# Altium footprint library Terminal_Blocks_Pluggable PCB_5.08mm.PcbLib: 299 footprints (part 16 of 19)
Each footprint in its own frame and in the unit in brackets; x right, y up, seen from the top. Pads: shape width x height; smd on the part's side, far side on the other; paste and mask are expansions set on the pad; w line width, h text height; cw(c..) or ccw(c..) is an arc to the next point about the centre after c.
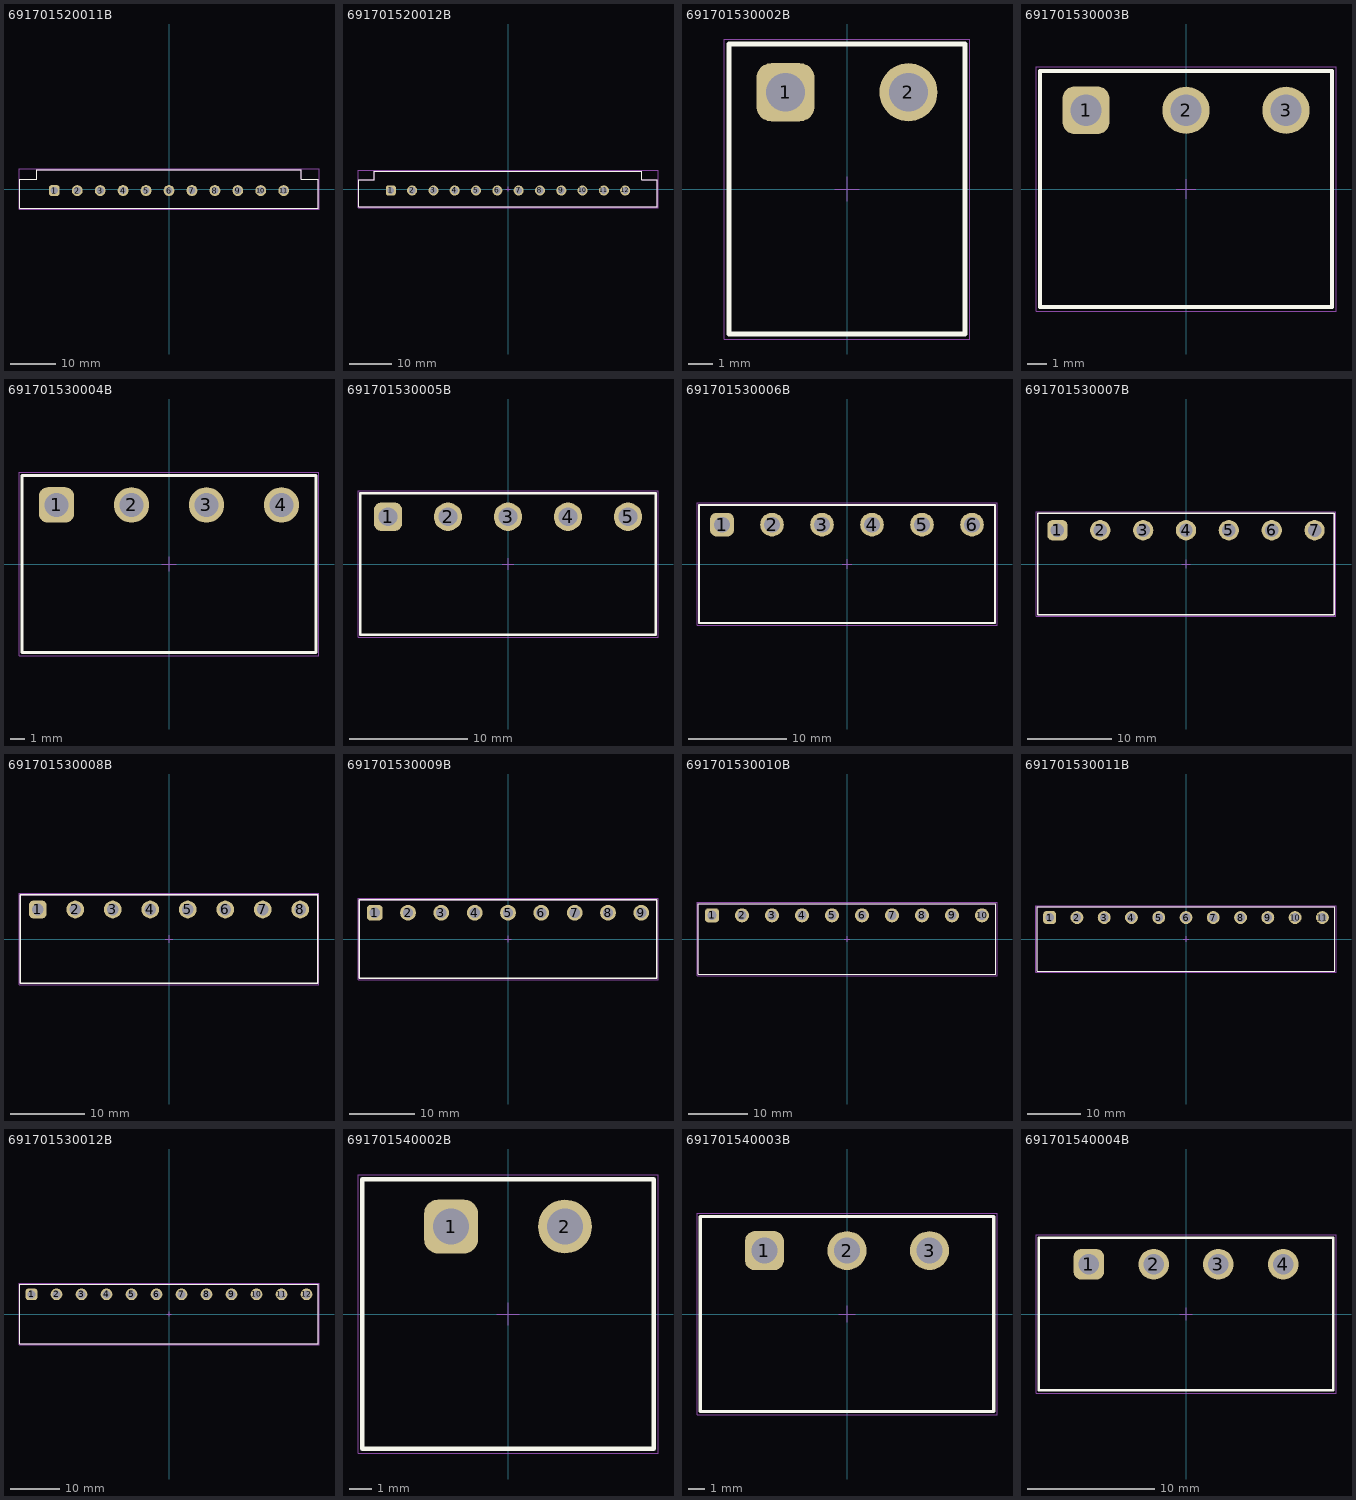
[diagram p15: the footprints below, top view; thin cyan lines are the x and y axes]

## 691701520011B [mm] "THR - 5,08mm - PCB Vertical Flange - 11p"
height 12
pads (11):
  rrect50% 2.4x2.4 hole 1.6: 1(-25.4,-0.35)
  round 2.4 hole 1.6: 2(-20.32,-0.35) 3(-15.24,-0.35) 4(-10.16,-0.35) 5(-5.08,-0.35) 6(0,-0.35) 7(5.08,-0.35) 8(10.16,-0.35) 9(15.24,-0.35) 10(20.32,-0.35) 11(25.4,-0.35)
Top Overlay:
  lines w0.2: -33.02,-4.25 33.02,-4.25 33.02,2.15 29.34,2.15 29.34,4.25 -29.34,4.25 -29.34,2.15 -33.02,2.15 -33.02,-4.25
Top Designator:
  text ".Designator" at -7.498,-0.5 h1.5
Top Component Outline:
  lines w0.1: -33.02,-4.25 -33.02,2.15 -29.34,2.15 -29.34,4.25 29.34,4.25 29.34,2.15 33.02,2.15 33.02,-4.25 -33.02,-4.25
Top 3D Body:
  lines w0.1: -33.02,-4.25 33.02,-4.25 33.02,2.15 29.34,2.15 29.34,4.25 -29.34,4.25 -29.34,2.15 -33.02,2.15 -33.02,-4.25
Top Courtyard:
  lines w0.05: -33.22,-4.45 33.22,-4.45 33.22,4.45 -33.22,4.45 -33.22,-4.45
Top Component Center:
  lines w0.05: -0.5,0 0.5,0 ; 0,-0.5 0,0.5
3D body "691701520011B.stp": height 12.1, standoff -2.5, extent -33.02,-4.25 33.02,4.25

## 691701520012B [mm] "THR - 5,08mm - PCB Vertical Flange - 12p"
height 12
pads (12):
  rrect50% 2.4x2.4 hole 1.6: 1(-27.94,-0.35)
  round 2.4 hole 1.6: 2(-22.86,-0.35) 3(-17.78,-0.35) 4(-12.7,-0.35) 5(-7.62,-0.35) 6(-2.54,-0.35) 7(2.54,-0.35) 8(7.62,-0.35) 9(12.7,-0.35) 10(17.78,-0.35) 11(22.86,-0.35) 12(27.94,-0.35)
Top Overlay:
  lines w0.2: -35.56,-4.25 -35.56,2.15 -31.88,2.15 -31.88,4.25 31.88,4.25 31.88,2.15 35.56,2.15 35.56,-4.25 -35.56,-4.25
Top Designator:
  text ".Designator" at -7.498,-0.5 h1.5
Top Component Outline:
  lines w0.1: -35.56,-4.25 35.56,-4.25 35.56,2.15 31.88,2.15 31.88,4.25 -31.88,4.25 -31.88,2.15 -35.56,2.15 -35.56,-4.25
Top 3D Body:
  lines w0.1: -35.56,-4.25 -35.56,2.15 -31.88,2.15 -31.88,4.25 31.88,4.25 31.88,2.15 35.56,2.15 35.56,-4.25 -35.56,-4.25
Top Courtyard:
  lines w0.05: -35.76,-4.45 -35.76,4.45 35.76,4.45 35.76,-4.45 -35.76,-4.45
Top Component Center:
  lines w0.05: -0.5,0 0.5,0 ; 0,-0.5 0,0.5
3D body "691701520012B.stp": height 12.1, standoff -2.5, extent -35.56,-4.25 35.56,4.25

## 691701530002B [mm] "THR - 5,08mm - PCB Horizontal Open - 02p"
height 8.4
pads (2):
  rrect50% 2.4x2.4 hole 1.6: 1(-2.54,4)
  round 2.4 hole 1.6: 2(2.54,4)
Top Overlay:
  lines w0.2: 4.84,-6 -4.88,-6 -4.88,6 4.84,6 ; 4.88,-6 4.88,6
Top Designator:
  text ".Designator" at -7.498,-0.5 h1.5
Top Component Outline:
  lines w0.1: 4.84,-6 -4.88,-6 -4.88,6 4.84,6 ; 4.88,-6 4.88,6
Top 3D Body:
  lines w0.1: 4.84,-6 -4.88,-6 -4.88,6 4.84,6 ; 4.88,-6 4.88,6
Top Courtyard:
  lines w0.05: -5.08,-6.2 -5.08,6.2 5.08,6.2 5.08,-6.2 -5.08,-6.2
Top Component Center:
  lines w0.05: -0.5,0 0.5,0 ; 0,-0.5 0,0.5
3D body "691701530002B.stp": height 8.6, standoff -2.7, extent -4.9,-6 4.86,6

## 691701530003B [mm] "THR - 5,08mm - PCB Horizontal Open - 03p"
height 8.4
pads (3):
  rrect50% 2.4x2.4 hole 1.6: 1(-5.08,4)
  round 2.4 hole 1.6: 2(0,4) 3(5.08,4)
Top Overlay:
  lines w0.2: -7.42,-6 -7.42,6 7.42,6 7.42,-6 -7.42,-6
Top Designator:
  text ".Designator" at -7.498,-0.5 h1.5
Top Component Outline:
  lines w0.1: -7.42,-6 7.42,-6 7.42,6 -7.42,6 -7.42,-6
Top 3D Body:
  lines w0.1: -7.42,-6 -7.42,6 7.42,6 7.42,-6 -7.42,-6
Top Courtyard:
  lines w0.05: -7.62,-6.2 7.62,-6.2 7.62,6.2 -7.62,6.2 -7.62,-6.2
Top Component Center:
  lines w0.05: -0.5,0 0.5,0 ; 0,-0.5 0,0.5
3D body "691701530003B.stp": height 8.6, standoff -2.7, extent -7.42,-6 7.42,6

## 691701530004B [mm] "THR - 5,08mm - PCB Horizontal Open - 04p"
height 8.4
pads (4):
  rrect50% 2.4x2.4 hole 1.6: 1(-7.62,4)
  round 2.4 hole 1.6: 2(-2.54,4) 3(2.54,4) 4(7.62,4)
Top Overlay:
  lines w0.2: -9.96,-6 9.96,-6 9.96,6 -9.96,6 -9.96,-6
Top Designator:
  text ".Designator" at -7.498,-0.5 h1.5
Top Component Outline:
  lines w0.1: -9.96,-6 -9.96,6 9.96,6 9.96,-6 -9.96,-6
Top 3D Body:
  lines w0.1: -9.96,-6 9.96,-6 9.96,6 -9.96,6 -9.96,-6
Top Courtyard:
  lines w0.05: -10.16,-6.2 -10.16,6.2 10.16,6.2 10.16,-6.2 -10.16,-6.2
Top Component Center:
  lines w0.05: -0.5,0 0.5,0 ; 0,-0.5 0,0.5
3D body "691701530004B.stp": height 8.6, standoff -2.7, extent -9.96,-6 9.96,6

## 691701530005B [mm] "THR - 5,08mm - PCB Horizontal Open - 05p"
height 8.4
pads (5):
  rrect50% 2.4x2.4 hole 1.6: 1(-10.16,4)
  round 2.4 hole 1.6: 2(-5.08,4) 3(0,4) 4(5.08,4) 5(10.16,4)
Top Overlay:
  lines w0.2: -12.5,-6 -12.5,6 12.5,6 12.5,-6 -12.5,-6
Top Designator:
  text ".Designator" at -7.498,-0.5 h1.5
Top Component Outline:
  lines w0.1: -12.5,-6 12.5,-6 12.5,6 -12.5,6 -12.5,-6
Top 3D Body:
  lines w0.1: -12.5,-6 -12.5,6 12.5,6 12.5,-6 -12.5,-6
Top Courtyard:
  lines w0.05: -12.7,-6.2 12.7,-6.2 12.7,6.2 -12.7,6.2 -12.7,-6.2
Top Component Center:
  lines w0.05: -0.5,0 0.5,0 ; 0,-0.5 0,0.5
3D body "691701530005B.stp": height 8.6, standoff -2.7, extent -12.5,-6 12.5,6

## 691701530006B [mm] "THR - 5,08mm - PCB Horizontal Open - 06p"
height 8.4
pads (6):
  rrect50% 2.4x2.4 hole 1.6: 1(-12.7,4)
  round 2.4 hole 1.6: 2(-7.62,4) 3(-2.54,4) 4(2.54,4) 5(7.62,4) 6(12.7,4)
Top Overlay:
  lines w0.2: -15.04,-6 15.04,-6 15.04,6 -15.04,6 -15.04,-6
Top Designator:
  text ".Designator" at -7.498,-0.5 h1.5
Top Component Outline:
  lines w0.1: -15.04,-6 -15.04,6 15.04,6 15.04,-6 -15.04,-6
Top 3D Body:
  lines w0.1: -15.04,-6 15.04,-6 15.04,6 -15.04,6 -15.04,-6
Top Courtyard:
  lines w0.05: -15.24,-6.2 -15.24,6.2 15.24,6.2 15.24,-6.2 -15.24,-6.2
Top Component Center:
  lines w0.05: -0.5,0 0.5,0 ; 0,-0.5 0,0.5
3D body "691701530006B.stp": height 8.6, standoff -2.7, extent -15.04,-6 15.04,6

## 691701530007B [mm] "THR - 5,08mm - PCB Horizontal Open - 07p"
height 8.4
pads (7):
  rrect50% 2.4x2.4 hole 1.6: 1(-15.24,4)
  round 2.4 hole 1.6: 2(-10.16,4) 3(-5.08,4) 4(0,4) 5(5.08,4) 6(10.16,4) 7(15.24,4)
Top Overlay:
  lines w0.2: -17.58,-6 17.58,-6 17.58,6 -17.58,6 -17.58,-6
Top Designator:
  text ".Designator" at -7.498,-0.5 h1.5
Top Component Outline:
  lines w0.1: -17.58,-6 -17.58,6 17.58,6 17.58,-6 -17.58,-6
Top 3D Body:
  lines w0.1: -17.58,-6 17.58,-6 17.58,6 -17.58,6 -17.58,-6
Top Courtyard:
  lines w0.05: -17.78,-6.2 -17.78,6.2 17.78,6.2 17.78,-6.2 -17.78,-6.2
Top Component Center:
  lines w0.05: -0.5,0 0.5,0 ; 0,-0.5 0,0.5
3D body "691701530007B.stp": height 8.6, standoff -2.7, extent -17.58,-6 17.58,6

## 691701530008B [mm] "THR - 5,08mm - PCB Horizontal Open - 08p"
height 8.4
pads (8):
  rrect50% 2.4x2.4 hole 1.6: 1(-17.78,4)
  round 2.4 hole 1.6: 2(-12.7,4) 3(-7.62,4) 4(-2.54,4) 5(2.54,4) 6(7.62,4) 7(12.7,4) 8(17.78,4)
Top Overlay:
  lines w0.2: -20.12,-6 20.12,-6 20.12,6 -20.12,6 -20.12,-6
Top Designator:
  text ".Designator" at -7.498,-0.5 h1.5
Top Component Outline:
  lines w0.1: -20.12,-6 -20.12,6 20.12,6 20.12,-6 -20.12,-6
Top 3D Body:
  lines w0.1: -20.12,-6 20.12,-6 20.12,6 -20.12,6 -20.12,-6
Top Courtyard:
  lines w0.05: -20.32,-6.2 -20.32,6.2 20.32,6.2 20.32,-6.2 -20.32,-6.2
Top Component Center:
  lines w0.05: -0.5,0 0.5,0 ; 0,-0.5 0,0.5
3D body "691701530008B.stp": height 8.6, standoff -2.7, extent -20.12,-6 20.12,6

## 691701530009B [mm] "THR - 5,08mm - PCB Horizontal Open - 09p"
height 8.4
pads (9):
  rrect50% 2.4x2.4 hole 1.6: 1(-20.32,4)
  round 2.4 hole 1.6: 2(-15.24,4) 3(-10.16,4) 4(-5.08,4) 5(0,4) 6(5.08,4) 7(10.16,4) 8(15.24,4) 9(20.32,4)
Top Overlay:
  lines w0.2: -22.66,-6 22.66,-6 22.66,6 -22.66,6 -22.66,-6
Top Designator:
  text ".Designator" at -7.498,-0.5 h1.5
Top Component Outline:
  lines w0.1: -22.66,-6 -22.66,6 22.66,6 22.66,-6 -22.66,-6
Top 3D Body:
  lines w0.1: -22.66,-6 22.66,-6 22.66,6 -22.66,6 -22.66,-6
Top Courtyard:
  lines w0.05: -22.86,-6.2 -22.86,6.2 22.86,6.2 22.86,-6.2 -22.86,-6.2
Top Component Center:
  lines w0.05: -0.5,0 0.5,0 ; 0,-0.5 0,0.5
3D body "691701530009B.stp": height 8.6, standoff -2.7, extent -22.66,-6 22.66,6

## 691701530010B [mm] "THR - 5,08mm - PCB Horizontal Open - 10p"
height 8.4
pads (10):
  rrect50% 2.4x2.4 hole 1.6: 1(-22.86,4)
  round 2.4 hole 1.6: 2(-17.78,4) 3(-12.7,4) 4(-7.62,4) 5(-2.54,4) 6(2.54,4) 7(7.62,4) 8(12.7,4) 9(17.78,4) 10(22.86,4)
Top Overlay:
  lines w0.2: -25.2,-6 -25.2,6 25.2,6 25.2,-6 -25.2,-6
Top Designator:
  text ".Designator" at -7.498,-0.5 h1.5
Top Component Outline:
  lines w0.1: -25.2,-6 25.2,-6 25.2,6 -25.2,6 -25.2,-6
Top 3D Body:
  lines w0.1: -25.2,-6 -25.2,6 25.2,6 25.2,-6 -25.2,-6
Top Courtyard:
  lines w0.05: -25.4,-6.2 25.4,-6.2 25.4,6.2 -25.4,6.2 -25.4,-6.2
Top Component Center:
  lines w0.05: -0.5,0 0.5,0 ; 0,-0.5 0,0.5
3D body "691701530010B.stp": height 8.6, standoff -2.7, extent -25.2,-6 25.2,6

## 691701530011B [mm] "THR - 5,08mm - PCB Horizontal Open - 11p"
height 8.4
pads (11):
  rrect50% 2.4x2.4 hole 1.6: 1(-25.4,4)
  round 2.4 hole 1.6: 2(-20.32,4) 3(-15.24,4) 4(-10.16,4) 5(-5.08,4) 6(0,4) 7(5.08,4) 8(10.16,4) 9(15.24,4) 10(20.32,4) 11(25.4,4)
Top Overlay:
  lines w0.2: -27.74,-6 27.74,-6 27.74,6 -27.74,6 -27.74,-6
Top Designator:
  text ".Designator" at -7.498,-0.5 h1.5
Top Component Outline:
  lines w0.1: -27.74,-6 -27.74,6 27.74,6 27.74,-6 -27.74,-6
Top 3D Body:
  lines w0.1: -27.74,-6 27.74,-6 27.74,6 -27.74,6 -27.74,-6
Top Courtyard:
  lines w0.05: -27.94,-6.2 -27.94,6.2 27.94,6.2 27.94,-6.2 -27.94,-6.2
Top Component Center:
  lines w0.05: -0.5,0 0.5,0 ; 0,-0.5 0,0.5
3D body "691701530011B.stp": height 8.6, standoff -2.7, extent -27.74,-6 27.74,6

## 691701530012B [mm] "THR - 5,08mm - PCB Horizontal Open - 12p"
height 8.4
pads (12):
  rrect50% 2.4x2.4 hole 1.6: 1(-27.94,4)
  round 2.4 hole 1.6: 2(-22.86,4) 3(-17.78,4) 4(-12.7,4) 5(-7.62,4) 6(-2.54,4) 7(2.54,4) 8(7.62,4) 9(12.7,4) 10(17.78,4) 11(22.86,4) 12(27.94,4)
Top Overlay:
  lines w0.2: -30.28,-6 -30.28,6 30.28,6 30.28,-6 -30.28,-6
Top Designator:
  text ".Designator" at -7.498,-0.5 h1.5
Top Component Outline:
  lines w0.1: -30.28,-6 30.28,-6 30.28,6 -30.28,6 -30.28,-6
Top 3D Body:
  lines w0.1: -30.28,-6 -30.28,6 30.28,6 30.28,-6 -30.28,-6
Top Courtyard:
  lines w0.05: -30.48,-6.2 30.48,-6.2 30.48,6.2 -30.48,6.2 -30.48,-6.2
Top Component Center:
  lines w0.05: -0.5,0 0.5,0 ; 0,-0.5 0,0.5
3D body "691701530012B.stp": height 8.6, standoff -2.7, extent -30.28,-6 30.28,6

## 691701540002B [mm] "THR - 5,08mm - PCB Horizontal Close - 02p"
height 8.5
pads (2):
  rrect50% 2.4x2.4 hole 1.6: 1(-2.54,3.9)
  round 2.4 hole 1.6: 2(2.54,3.9)
Top Overlay:
  lines w0.2: -6.49,-6 -6.49,6 6.49,6 6.49,-6 -6.49,-6
Top Designator:
  text ".Designator" at -7.498,-0.5 h1.5
Top Component Outline:
  lines w0.1: -6.49,-6 6.49,-6 6.49,6 -6.49,6 -6.49,-6
Top 3D Body:
  lines w0.1: -6.49,-6 -6.49,6 6.49,6 6.49,-6 -6.49,-6
Top Courtyard:
  lines w0.05: -6.69,-6.2 6.69,-6.2 6.69,6.2 -6.69,6.2 -6.69,-6.2
Top Component Center:
  lines w0.05: -0.5,0 0.5,0 ; 0,-0.5 0,0.5
3D body "691701540002B.stp": height 8.6, standoff -2.7, extent -6.49,-6 6.47,6

## 691701540003B [mm] "THR - 5,08mm - PCB Horizontal Close - 03p"
height 8.5
pads (3):
  rrect50% 2.4x2.4 hole 1.6: 1(-5.08,3.9)
  round 2.4 hole 1.6: 2(0,3.9) 3(5.08,3.9)
Top Overlay:
  lines w0.2: -9.03,-6 9.03,-6 9.03,6 -9.03,6 -9.03,-6
Top Designator:
  text ".Designator" at -7.498,-0.5 h1.5
Top Component Outline:
  lines w0.1: -9.03,-6 -9.03,6 9.03,6 9.03,-6 -9.03,-6
Top 3D Body:
  lines w0.1: -9.03,-6 9.03,-6 9.03,6 -9.03,6 -9.03,-6
Top Courtyard:
  lines w0.05: -9.23,-6.2 -9.23,6.2 9.23,6.2 9.23,-6.2 -9.23,-6.2
Top Component Center:
  lines w0.05: -0.5,0 0.5,0 ; 0,-0.5 0,0.5
3D body "691701540003B.stp": height 8.6, standoff -2.7, extent -9.02,-6 9.02,6

## 691701540004B [mm] "THR - 5,08mm - PCB Horizontal Close - 04p"
height 8.5
pads (4):
  rrect50% 2.4x2.4 hole 1.6: 1(-7.62,3.9)
  round 2.4 hole 1.6: 2(-2.54,3.9) 3(2.54,3.9) 4(7.62,3.9)
Top Overlay:
  lines w0.2: -11.57,-6 -11.57,6 11.57,6 11.57,-6 -11.57,-6
Top Designator:
  text ".Designator" at -7.498,-0.5 h1.5
Top Component Outline:
  lines w0.1: -11.57,-6 11.57,-6 11.57,6 -11.57,6 -11.57,-6
Top 3D Body:
  lines w0.1: -11.57,-6 -11.57,6 11.57,6 11.57,-6 -11.57,-6
Top Courtyard:
  lines w0.05: -11.77,-6.2 11.77,-6.2 11.77,6.2 -11.77,6.2 -11.77,-6.2
Top Component Center:
  lines w0.05: -0.5,0 0.5,0 ; 0,-0.5 0,0.5
3D body "691701540004B.stp": height 8.6, standoff -2.7, extent -11.56,-6 11.56,6